# Altium footprint library ACB_PcbLib.PcbLib: 167 footprints (part 4 of 11)
Each footprint in its own frame and in the unit in brackets; x right, y up, seen from the top. Pads: shape width x height; smd on the part's side, far side on the other; paste and mask are expansions set on the pad; w line width, h text height; cw(c..) or ccw(c..) is an arc to the next point about the centre after c.
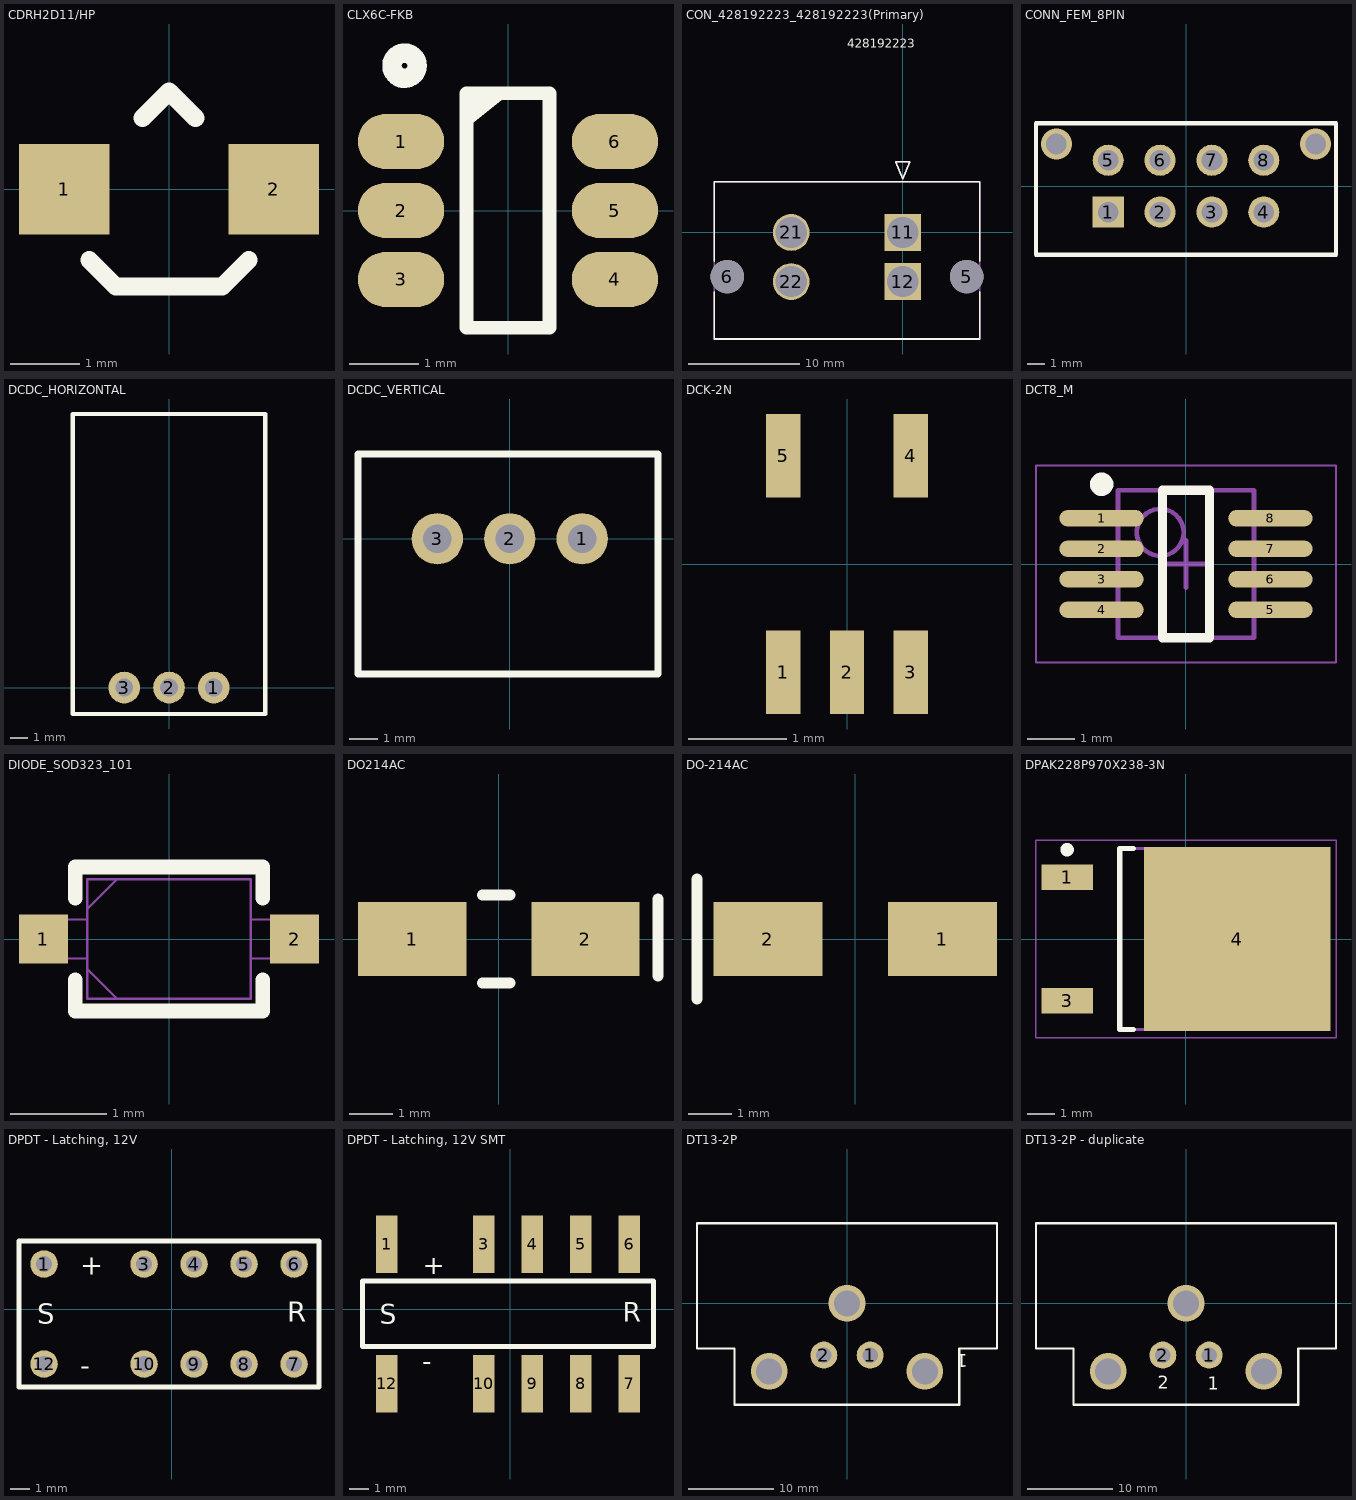
[diagram p3: the footprints below, top view; thin cyan lines are the x and y axes]

## CDRH2D11/HP [mm]
pads (2):
  rect 1.3x1.3 smd: 1(-1.5,0) 2(1.5,0)
Top Overlay:
  lines w0.254: -1.143,-1.016 -0.762,-1.397 0.762,-1.397 1.143,-1.016 ; -0.381,1.019 0,1.4 0.381,1.019

## CLX6C-FKB [mm]
pads (6):
  oval 1.25x0.8 smd: 1(-1.55,1) 2(-1.55,0) 3(-1.55,-1) 4(1.55,-1) 5(1.55,0) 6(1.55,1)
Top Overlay:
  circle w0.2: c-1.5,2.1 r0.224
  circle w0.2: c-1.5,2.1 r0.141
  region: -0.6,1.7 -0.1,1.6 -0.6,1.2
  lines w0.2: -0.6,-1.7 0.6,-1.7 0.6,1.7 -0.6,1.7 -0.6,-1.7
3D body: height 2.8, standoff 0, extent -1.7,-1.7 1.7,1.7

## CON_428192223_428192223(Primary) [mm]
pads (6):
  round 3 hole 3 mask-25.4: 5(5.73,-3.95) 6(-15.73,-3.95)
  rect 3.3x3.3 hole 2.8 mask-25.4: 11(0,0) 12(0,-4.4)
  round 3.3 hole 2.8 mask-25.4: 21(-10,0) 22(-10,-4.4)
Top Overlay:
  lines w0.152: -16.91,-5.332 -16.91,-9.55 6.91,-9.55 6.91,-5.332 ; -16.91,-2.568 -16.91,4.55 6.91,4.55 6.91,-2.568 ; -0.635,6.328 0,4.804 0.635,6.328 -0.635,6.328
  text "428192223" at -5,16.55 h0.79
Top Solder:
  region: -15.73,-2.366 -16.039,-2.397 -16.336,-2.487 -16.61,-2.633 -16.85,-2.83 -17.047,-3.07 -17.193,-3.344 -17.283,-3.641 -17.314,-3.95 -17.283,-4.259 -17.193,-4.556 -17.047,-4.83 -16.85,-5.07 -16.61,-5.267 -16.336,-5.413 -16.039,-5.503 -15.73,-5.534 -15.421,-5.503 -15.124,-5.413 -14.85,-5.267 -14.61,-5.07 -14.413,-4.83 -14.267,-4.556 -14.177,-4.259 -14.146,-3.95 -14.177,-3.641 -14.267,-3.344 -14.413,-3.07 -14.61,-2.83 -14.85,-2.633 -15.124,-2.487 -15.421,-2.397
  region: 5.73,-2.366 5.421,-2.397 5.124,-2.487 4.85,-2.633 4.61,-2.83 4.413,-3.07 4.267,-3.344 4.177,-3.641 4.146,-3.95 4.177,-4.259 4.267,-4.556 4.413,-4.83 4.61,-5.07 4.85,-5.267 5.124,-5.413 5.421,-5.503 5.73,-5.534 6.039,-5.503 6.336,-5.413 6.61,-5.267 6.85,-5.07 7.047,-4.83 7.193,-4.556 7.283,-4.259 7.314,-3.95 7.283,-3.641 7.193,-3.344 7.047,-3.07 6.85,-2.83 6.61,-2.633 6.336,-2.487 6.039,-2.397
  region: -10,-2.666 -10.338,-2.699 -10.664,-2.798 -10.964,-2.958 -11.226,-3.174 -11.442,-3.436 -11.602,-3.736 -11.701,-4.062 -11.734,-4.4 -11.701,-4.738 -11.602,-5.064 -11.442,-5.364 -11.226,-5.626 -10.964,-5.842 -10.664,-6.002 -10.338,-6.101 -10,-6.134 -9.662,-6.101 -9.336,-6.002 -9.036,-5.842 -8.774,-5.626 -8.558,-5.364 -8.398,-5.064 -8.299,-4.738 -8.266,-4.4 -8.299,-4.062 -8.398,-3.736 -8.558,-3.436 -8.774,-3.174 -9.036,-2.958 -9.336,-2.798 -9.662,-2.699
  region: -10,1.734 -10.338,1.701 -10.664,1.602 -10.964,1.442 -11.226,1.226 -11.442,0.964 -11.602,0.664 -11.701,0.338 -11.734,0 -11.701,-0.338 -11.602,-0.664 -11.442,-0.964 -11.226,-1.226 -10.964,-1.442 -10.664,-1.602 -10.338,-1.701 -10,-1.734 -9.662,-1.701 -9.336,-1.602 -9.036,-1.442 -8.774,-1.226 -8.558,-0.964 -8.398,-0.664 -8.299,-0.338 -8.266,0 -8.299,0.338 -8.398,0.664 -8.558,0.964 -8.774,1.226 -9.036,1.442 -9.336,1.602 -9.662,1.701
  region: -1.726,-6.126 1.726,-6.126 1.726,-2.674 -1.726,-2.674
  region: -1.726,-1.726 1.726,-1.726 1.726,1.726 -1.726,1.726
Bottom Solder:
  region: -15.73,-2.366 -16.039,-2.397 -16.336,-2.487 -16.61,-2.633 -16.85,-2.83 -17.047,-3.07 -17.193,-3.344 -17.283,-3.641 -17.314,-3.95 -17.283,-4.259 -17.193,-4.556 -17.047,-4.83 -16.85,-5.07 -16.61,-5.267 -16.336,-5.413 -16.039,-5.503 -15.73,-5.534 -15.421,-5.503 -15.124,-5.413 -14.85,-5.267 -14.61,-5.07 -14.413,-4.83 -14.267,-4.556 -14.177,-4.259 -14.146,-3.95 -14.177,-3.641 -14.267,-3.344 -14.413,-3.07 -14.61,-2.83 -14.85,-2.633 -15.124,-2.487 -15.421,-2.397
  region: 5.73,-2.366 5.421,-2.397 5.124,-2.487 4.85,-2.633 4.61,-2.83 4.413,-3.07 4.267,-3.344 4.177,-3.641 4.146,-3.95 4.177,-4.259 4.267,-4.556 4.413,-4.83 4.61,-5.07 4.85,-5.267 5.124,-5.413 5.421,-5.503 5.73,-5.534 6.039,-5.503 6.336,-5.413 6.61,-5.267 6.85,-5.07 7.047,-4.83 7.193,-4.556 7.283,-4.259 7.314,-3.95 7.283,-3.641 7.193,-3.344 7.047,-3.07 6.85,-2.83 6.61,-2.633 6.336,-2.487 6.039,-2.397
  region: -10,-2.666 -10.338,-2.699 -10.664,-2.798 -10.964,-2.958 -11.226,-3.174 -11.442,-3.436 -11.602,-3.736 -11.701,-4.062 -11.734,-4.4 -11.701,-4.738 -11.602,-5.064 -11.442,-5.364 -11.226,-5.626 -10.964,-5.842 -10.664,-6.002 -10.338,-6.101 -10,-6.134 -9.662,-6.101 -9.336,-6.002 -9.036,-5.842 -8.774,-5.626 -8.558,-5.364 -8.398,-5.064 -8.299,-4.738 -8.266,-4.4 -8.299,-4.062 -8.398,-3.736 -8.558,-3.436 -8.774,-3.174 -9.036,-2.958 -9.336,-2.798 -9.662,-2.699
  region: -10,1.734 -10.338,1.701 -10.664,1.602 -10.964,1.442 -11.226,1.226 -11.442,0.964 -11.602,0.664 -11.701,0.338 -11.734,0 -11.701,-0.338 -11.602,-0.664 -11.442,-0.964 -11.226,-1.226 -10.964,-1.442 -10.664,-1.602 -10.338,-1.701 -10,-1.734 -9.662,-1.701 -9.336,-1.602 -9.036,-1.442 -8.774,-1.226 -8.558,-0.964 -8.398,-0.664 -8.299,-0.338 -8.266,0 -8.299,0.338 -8.398,0.664 -8.558,0.964 -8.774,1.226 -9.036,1.442 -9.336,1.602 -9.662,1.701
  region: -1.726,-6.126 1.726,-6.126 1.726,-2.674 -1.726,-2.674
  region: -1.726,-1.726 1.726,-1.726 1.726,1.726 -1.726,1.726
Mechanical 1:
  lines w0.127: -0.635,6.328 0.635,6.328 0,4.804 ; -16.91,-9.55 -16.91,4.55 6.91,4.55 6.91,-9.55 -16.91,-9.55
  text "428192223" at -5,16.55 h0.79
Mechanical 16:
  lines w0.127: -16.91,-9.55 6.91,-9.55 6.91,4.55 -16.91,4.55 -16.91,-9.55 ; -0.635,6.328 0,4.804 0.635,6.328 -0.635,6.328

## CONN_FEM_8PIN [mm]
pads (8):
  rect 1.8x1.8 hole 1.2: 1(-4.5,-1.5)
  round 1.8 hole 1.2: 2(-1.5,-1.5) 3(1.5,-1.5) 4(4.5,-1.5) 5(-4.5,1.5) 6(-1.5,1.5) 7(1.5,1.5) 8(4.5,1.5)
via 7.5,2.44 diameter 1.8 hole 1.2
via -7.5,2.44 diameter 1.8 hole 1.2
Top Overlay:
  lines w0.254: -8.675,-3.975 -8.675,3.65 8.675,3.65 8.675,-3.975 -8.675,-3.975
  text "." at -4.625,-4.775 h1.52
3D body "430450812.stp": height 9.95, standoff -3.14, extent -8.1,-3.945 8.05,4.825

## DCDC_HORIZONTAL [mm]
pads (3):
  round 1.8 hole 1: 1(2.54,0) 2(0,0) 3(-2.54,0)
Top Overlay:
  lines w0.254: -5.45,-1.5 5.45,-1.5 5.45,15.5 -5.45,15.5 -5.45,-1.5
3D body "mps_dcdc_oki_78sr_horiz_a.step": height 7.75, standoff -5.18, extent -5.232,-1.285 5.182,15.225

## DCDC_VERTICAL [mm]
pads (3):
  round 1.8 hole 1: 1(2.54,0) 2(0,0) 3(-2.54,0)
Top Overlay:
  lines w0.254: -5.325,-4.75 5.2,-4.75 5.2,2.975 -5.325,2.975 -5.325,-4.75
3D body "mps_dcdc_oki_78sr_a.step": height 17.18, standoff -2.63, extent -5.275,-4.867 5.139,2.867

## DCK-2N [mm] "2 input nand"
pads (5):
  rect 0.35x0.85 smd: 1(-0.65,-1.1) 2(0,-1.1) 3(0.65,-1.1) 4(0.65,1.1) 5(-0.65,1.1)
3D body: height 1.1, standoff 0, extent -1.075,-0.7 1.075,0.7
3D body: height 0.25, standoff 0, extent -3.125,0.675 -2.85,0.95

## DCT8_M [mm] "TSOP, 8-Leads, Body 3x2.8mm, Pitch 0.65mm, IPC Low Density"
height 1.3
pads (8):
  oval 1.8x0.35 smd: 1(-1.8,0.975) 2(-1.8,0.325) 3(-1.8,-0.325) 4(-1.8,-0.975) 5(1.8,-0.975) 6(1.8,-0.325) 7(1.8,0.325) 8(1.8,0.975)
Top Overlay:
  circle w0.25: c-1.8,1.7 r0.125
  lines w0.2: -0.5,-1.575 0.5,-1.575 0.5,1.575 -0.5,1.575 -0.5,-1.575
Mechanical 13:
  circle w0.1: c-0.55,0.675 r0.5
  lines w0.1: -1.45,-1.575 1.45,-1.575 1.45,1.575 -1.45,1.575 -1.45,-1.575
Mechanical 15:
  lines w0.05: -3.2,-2.1 3.2,-2.1 3.2,2.1 -3.2,2.1 -3.2,-2.1
  lines w0.1: -0.5,0 0.5,0 ; 0,-0.5 0,0.5
3D body: height 1.3, standoff 0, extent -1.45,-1.575 1.45,1.575

## DIODE_SOD323_101 [mil]
pads (2):
  rect 20x20 smd: 1(-51.5,0) 2(51.5,0)
Top Overlay:
  lines w6: -38.5,-16.74 -38.5,-29.5 38.5,-29.5 38.5,-16.74 ; -38.5,16.74 -38.5,29.5 38.5,29.5 38.5,16.74
Mechanical 1:
  lines w1: -33.5,-12.25 -21.25,-24.5 ; -33.5,12.25 -21.25,24.5 ; -53,-8 -53,8 -33.5,8 -33.5,-8 -53,-8 ; -33.5,-24.5 33.5,-24.5 33.5,24.5 -33.5,24.5 -33.5,-24.5 ; 33.5,-8 33.5,8 53,8 53,-8 33.5,-8
  text "*" at -23.5,0 h31.25
3D body "DIODE_SOD323_1P8X1P35-M.step": height 39.25, standoff 0, extent -53,-24.49 52.98,24.49

## DO214AC [mm]
pads (2):
  rect 2.5x1.7 smd: 1(-2,0) 2(2,0)
Top Overlay:
  lines w0.254: -0.381,-1.016 0.254,-1.016 ; -0.381,1.016 0.254,1.016 ; 3.675,-0.853 3.675,0.925
3D body: height 2.5, standoff 0, extent -2.421,-1.1 2.4,1.1

## DO-214AC [mm]
pads (2):
  rect 2.5x1.7 smd: 1(2,0) 2(-2,0)
Top Overlay:
  lines w0.254: -3.625,-1.375 -3.625,1.375
3D body: height 2.5, standoff 0, extent -2.375,-1.45 2.375,1.45

## DPAK228P970X238-3N [mm] "D-PAK, 3-Pads, Body 6.20x6.72mm (max), IPC Medium Density"
height 2.38
pads (3):
  rect 1.9x0.95 smd: 1(-4.4,2.28) 3(-4.4,-2.28)
  rect 6.9x6.8 smd: 4(1.9,0)
Top Overlay:
  circle w0.25: c-4.4,3.305 r0.125
  lines w0.2: -1.95,-3.35 -2.45,-3.35 -2.45,3.35 -1.95,3.35
Mechanical 13:
  lines w0.1: -2.45,-3.35 -2.45,3.35 3.75,3.35 3.75,-3.35 -2.45,-3.35
Mechanical 15:
  lines w0.05: -5.55,-3.65 -5.55,3.65 5.55,3.65 5.55,-3.65 -5.55,-3.65
  lines w0.1: -0.5,0 0.5,0 ; 0,-0.5 0,0.5
3D body: height 2.54, standoff -2.54, extent -1277.84,-1270.26 -1272.76,-1265.18

## DPDT - Latching, 12V [mil] "EC2-12TNU"
pads (10):
  round 55 hole 32: 1(-255,90) 3(-55,90) 4(45,90) 5(145,90) 6(245,90) 7(245,-110) 8(145,-110) 9(45,-110) 10(-55,-110) 12(-255,-110)
Top Overlay:
  lines w9.84: -305,-155.67 295,-155.67 295,135.67 -305,135.67 -305,-155.67
  text "-" at -182.17,-132.05 h40
  text "+" at -182.17,68.74 h40
  text "R" at 231.22,-25.75 h40
  text "S" at -268.78,-29.68 h40
3D body: height 100, standoff 0, extent 235.16,-119.82 254.85,-100.16
3D body: height 100, standoff 0, extent 235.16,80.17 254.85,99.84
3D body: height 100, standoff 0, extent 135.16,80.18 154.85,99.84
3D body: height 100, standoff 0, extent 135.16,-119.82 154.85,-100.16
3D body: height 100, standoff 0, extent 35.16,-119.82 54.85,-100.16
3D body: height 100, standoff 0, extent 35.16,80.17 54.85,99.83
3D body: height 100, standoff 0, extent -64.84,-119.82 -45.15,-100.16
3D body: height 100, standoff 0, extent -64.84,80.18 -45.15,99.84
3D body: height 100, standoff 0, extent -264.84,-119.82 -245.15,-100.16
3D body: height 100, standoff 0, extent -264.84,80.17 -245.15,99.84
3D body: height 370.08, standoff 0, extent -305,-155 295,135

## DPDT - Latching, 12V SMT [mm] "EE2-12TNU"
pads (10):
  rect 1.11x3 smd: 1(-6.477,3.391) 3(-1.397,3.391) 4(1.143,3.391) 5(3.683,3.391) 6(6.223,3.391) 7(6.223,-3.899) 8(3.683,-3.899) 9(1.143,-3.899) 10(-1.397,-3.899) 12(-6.477,-3.899)
Top Overlay:
  lines w0.25: -7.747,-1.956 7.493,-1.956 7.493,1.473 -7.747,1.473 -7.747,-1.956
  text "-" at -4.623,-3.2 h1.02
  text "+" at -4.597,1.829 h1.02
  text "R" at 5.873,-0.654 h1.02
  text "S" at -6.827,-0.754 h1.02
3D body: height 9.4, standoff 0, extent -7.747,-3.937 7.493,3.429

## DT13-2P [mil]
pads (2):
  round 125 hole 72: 1(107.5,-240) 2(-107.5,-240)
via 0,0 diameter 170 hole 120
via -360.5,-315 diameter 170 hole 120
via 360.5,-315 diameter 170 hole 120
Top Overlay:
  lines w10: -521,-470 520,-470 520,-210 695,-210 695,371 ; -521,-465 -521,-210 -695,-210 -695,371 690,371
  text "1" at 560,-235 h60
3D body "DT13-2P.stp": height 1090, standoff -121, extent -695,-475 695,945

## DT13-2P - duplicate [mil]
pads (2):
  round 125 hole 72: 1(107.5,-240) 2(-107.5,-240)
via 360.5,-315 diameter 170 hole 120
via -360.5,-315 diameter 170 hole 120
via 0,0 diameter 170 hole 120
Top Overlay:
  lines w10: -521,-470 520,-470 520,-210 695,-210 695,371 ; -521,-465 -521,-210 -695,-210 -695,371 690,371
  text "." at 550,-455 h60
  text "1" at 100,-400 h60
  text "2" at -130,-395 h60
3D body "DT13-2P.stp": height 1090, standoff -121, extent -695,-475 695,945